# Altium footprint library SYNCBOX_V3I1.PcbLib: 251 footprints (part 12 of 16)
Each footprint in its own frame and in the unit in brackets; x right, y up, seen from the top. Pads: shape width x height; smd on the part's side, far side on the other; paste and mask are expansions set on the pad; w line width, h text height; cw(c..) or ccw(c..) is an arc to the next point about the centre after c.
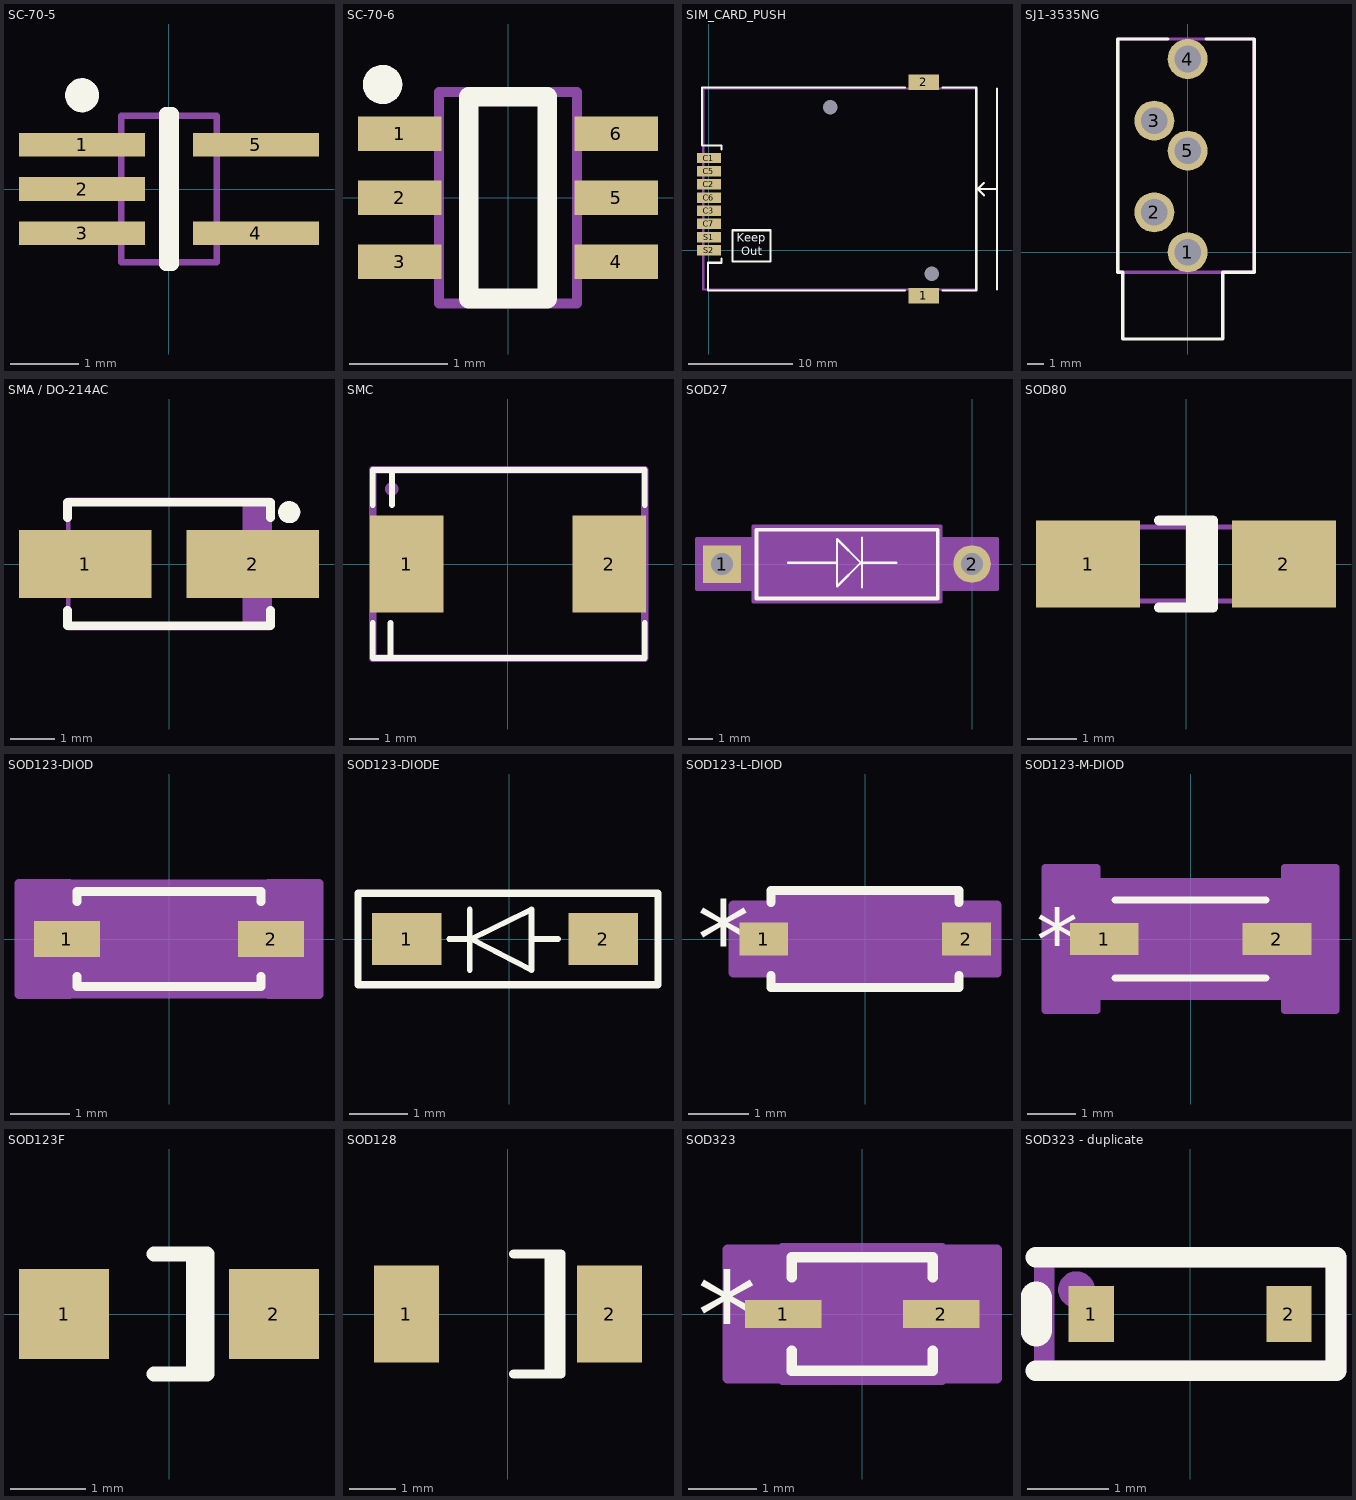
[diagram p11: the footprints below, top view; thin cyan lines are the x and y axes]

## SC-70-5 [mm] "SOT23, 5-Leads, Body 2.2x2.4mm (max), Pitch 0.65mm, IPC Medium Density"
height 1.1
pads (5):
  rect 1.85x0.35 smd: 1(-1.275,0.65) 2(-1.275,0) 3(-1.275,-0.65) 4(1.275,-0.65) 5(1.275,0.65)
Top Overlay:
  circle w0.25: c-1.275,1.375 r0.125
  lines w0.2: -0.05,-1.1 0.05,-1.1 0.05,1.1 -0.05,1.1 -0.05,-1.1
Mechanical 13:
  lines w0.1: -0.7,-1.075 -0.7,1.075 0.7,1.075 0.7,-1.075 -0.7,-1.075
3D body: height 1.1, standoff 0, extent -0.7,-1.075 0.7,1.075

## SC-70-6 [mm]
height 1.1
pads (6):
  rect 0.85x0.35 smd: 1(-1.1,0.65) 2(-1.1,0) 3(-1.1,-0.65) 4(1.1,-0.65) 5(1.1,0) 6(1.1,0.65)
Top Overlay:
  circle w0.2: c-1.275,1.15 r0.1
  lines w0.2: -0.4,-1.025 0.4,-1.025 0.4,1.025 -0.4,1.025 -0.4,-1.025
Mechanical 13:
  lines w0.1: -0.7,-1.075 -0.7,1.075 0.7,1.075 0.7,-1.075 -0.7,-1.075
3D body: height 1.1, standoff 0, extent -0.7,-1.075 0.7,1.075

## SIM_CARD_PUSH [mm]
pads (12):
  rect 2.95x1.5 smd: 1(20.7,-4.37) 2(20.7,16.18)
  rrect70% 0x0 hole 1.4: 3(21.47,-2.26) 4(11.67,13.79)
  rect 2.3x1 smd mask+0.051: C1(0,8.89) C2(0,6.35) C3(0,3.81) C5(0,7.62) C6(0,5.08) C7(0,2.54) S1(0,1.27) S2(0,0)
Top Overlay:
  lines w0.2: 1.19,9.71 1.19,10.1 -0.65,10.1 -0.65,15.68 18.9,15.68 ; 1.2,-0.8 1.2,-1.2 -0.1,-1.2 -0.1,-3.87 18.9,-3.87 ; 22.5,-3.87 25.75,-3.87 25.75,15.68 22.5,15.68 ; 26.5,5.3 25.9,5.9 ; 26.5,6.5 25.9,5.9 ; 27.75,-3.77 27.75,15.58 ; 27.75,5.9 25.9,5.9 ; 2.25,-1.07 2.25,1.93 5.95,1.93 5.95,-1.07 2.25,-1.07
  text "Out" at 3.1,-0.5 h0.8
  text "Keep" at 2.7,0.8 h0.8
Mechanical 16:
  lines w0.2: -0.55,-3.77 -0.55,15.58 25.75,15.58 25.75,-3.77 -0.55,-3.77
Mechanical 29:
  text ".Designator" at 14.5,6 h1.52
3D body "475531001.stp": height 1.8, standoff -0.7, extent -0.55,-4.6 25.95,16.35

## SJ1-3535NG [mm]
pads (5):
  round 2.4 hole 1.6: 1(0,0) 2(-2,2.4) 3(-2,7.9) 4(0,11.6) 5(0,6.1)
Top Overlay:
  lines w0.2: -1.2,12.8 -4.2,12.8 -4.2,-1.2 -3.9,-1.2 -3.9,-5.2 2.1,-5.2 2.1,-1.2 4,-1.2 4,12.8 1.1,12.8
Top Solder:
  region: -1.65,8.65 0.65,6.35 -0.35,5.35 -2.65,7.65
Mechanical 1:
  lines w0.2: -4.2,12.8 -4.2,12.8
Mechanical 16:
  lines w0.2: -4.2,-1.2 -4.2,12.8 4,12.8 4,-1.2 -4.2,-1.2
Mechanical 29:
  text ".Designator" at -2,5.5 h1.2
3D body "SJ1-3535NG-PI.step": height 12.3, standoff -3.3, extent -4.2,-5.25 4,12.8

## SMA / DO-214AC [mm]
height 2.62
pads (2):
  rect 3x1.55 smd: 1(-1.9,0) 2(1.9,0)
Top Overlay:
  circle w0.25: c2.725,1.175 r0.125
  lines w0.2: -2.3,-1.05 -2.3,-1.4 2.3,-1.4 2.3,-1.05 ; -2.3,1.05 -2.3,1.4 2.3,1.4 2.3,1.05
Mechanical 13:
  rectangle: 1.67,-1.46 2.285,1.46
  lines w0.1: -2.285,-1.46 -2.285,1.46 2.285,1.46 2.285,-1.46 -2.285,-1.46
3D body: height 2.62, standoff 0, extent -2.285,-1.46 2.285,1.46

## SMC [mm]
pads (2):
  rect 2.5x3.3 smd: 1(-3.45,0) 2(3.45,0)
Top Overlay:
  lines w0.2: -4.6,-2 -4.6,-3.2 4.65,-3.2 4.65,-2 ; -4.6,2 -4.6,3.2 4.65,3.2 4.65,2 ; -4,-3.2 -4,-2 ; -3.95,2 -3.95,3.2
Mechanical 16:
  circle w0.254: c-3.95,2.55 r0.1
  lines w0.254: -4.6,-3.2 4.65,-3.2 4.65,3.2 -4.6,3.2 -4.6,-3.2
Mechanical 29:
  text ".Designator" at 2.1,0.8 h1.52
3D body "DO-214AB SMC.step": height 2.3, standoff 0, extent -3.975,-2.95 3.975,2.95

## SOD27 [mil]
pads (2):
  rect 60x60 / inner round 60 / far side rect 60x60 hole 35 paste+0 mask+0: 1(-400,0)
  round 60 hole 35 paste+0 mask+0: 2(0,0)
Top Overlay:
  lines w3.94: -294,2 -216,2 ; -176,-37 -176,42 ; -121,2 -178,2 ; -178,2 -216,40 -216,-36 -178,2
  lines w6: -345,-55 -55,-55 -55,55 -345,55 -345,-55
Mechanical 13:
  lines w1: -400,0 -340,0 ; -60,0 0,0 ; -340,-50 -60,-50 -60,50 -340,50 -340,-50
Mechanical 15:
  region: -350,-40 -440,-40 -440,40 -350,40 -350,60 -50,60 -50,40 40,40 40,-40 -50,-40 -50,-60 -350,-60
  lines w6: -440,-40 -440,40 -350,40 -350,60 -50,60 -50,40 40,40 40,-40 -50,-40 -50,-60 -350,-60 -350,-40 -440,-40
3D body: height 10, standoff 0, extent 0,0 10,10
3D body "SOD27.stp": height 100, standoff -110, extent -415,-50 15,50

## SOD80 [mm] "MELF Diode, 2-Leads, Body 3,4x1,4mm, IPC Low Density"
height 1.5
pads (2):
  rect 2.1x1.75 smd: 1(-1.975,0) 2(1.975,0)
Top Overlay:
  rectangle: 0,-0.875 0.55,0.875
  lines w0.2: -0.55,-0.875 0.55,-0.875 0.55,0.875 -0.55,0.875
Mechanical 13:
  rectangle: 1.316,-0.75 1.8,0.75
  lines w0.1: -1.8,-0.75 1.8,-0.75 1.8,0.75 -1.8,0.75 -1.8,-0.75
3D body: height 1.5, standoff 0, extent -1.8,-0.75 1.8,0.75

## SOD123-DIOD [mm]
pads (2):
  rect 1.111x0.601 smd paste+0 mask+0: 1(-1.725,0) 2(1.725,0)
Top Overlay:
  lines w0.152: -1.552,-0.633 -1.552,-0.802 1.552,-0.802 1.552,-0.633 ; -1.552,0.633 -1.552,0.802 1.552,0.802 1.552,0.633
Mechanical 13:
  lines w0.025: -1.425,-0.337 -1.087,-0.675 ; -1.425,0.337 -1.087,0.675 ; -1.925,-0.275 -1.425,-0.275 -1.425,0.275 -1.925,0.275 -1.925,-0.275 ; -1.425,-0.675 -1.425,0.675 1.425,0.675 1.425,-0.675 -1.425,-0.675 ; 1.425,-0.275 1.925,-0.275 1.925,0.275 1.425,0.275 1.425,-0.275
  text "*" at -1.488,-0.635 h1.27
Mechanical 15:
  region: -1.679,-0.937 -2.535,-0.937 -2.535,0.937 -1.679,0.937 -1.679,0.929 1.679,0.929 1.679,0.937 2.535,0.937 2.535,-0.937 1.679,-0.937 1.679,-0.929 -1.679,-0.929
  lines w0.152: -2.535,-0.937 -1.679,-0.937 -1.679,-0.929 1.679,-0.929 1.679,-0.937 2.535,-0.937 2.535,0.937 1.679,0.937 1.679,0.929 -1.679,0.929 -1.679,0.937 -2.535,0.937 -2.535,-0.937
3D body "SOD123.stp": height 0.81, standoff 0, extent -1.925,-0.675 1.925,0.675
3D body: height 0.25, standoff 0, extent 0,0 0.254,0.254

## SOD123-DIODE [mm]
pads (2):
  rect 1.2x0.9 smd: 1(-1.778,0) 2(1.622,0)
Top Overlay:
  lines w0.1: -1.041,0 -0.66,0 ; -0.686,-0.533 -0.686,0.508 ; 0.432,0 0.838,0 ; -0.66,0 0.381,0.508 0.381,-0.533 -0.66,0
  lines w0.127: -2.616,-0.787 2.565,-0.787 2.565,0.787 -2.616,0.787 -2.616,-0.787
3D body "SOD123.stp": height 0.81, standoff 0, extent -1.925,-0.675 1.925,0.675

## SOD123-L-DIOD [mm]
pads (2):
  rect 0.806x0.55 smd paste+0 mask+0: 1(-1.674,0) 2(1.674,0)
Top Overlay:
  lines w0.152: -1.552,-0.608 -1.552,-0.802 1.552,-0.802 1.552,-0.608 ; -1.552,0.608 -1.552,0.802 1.552,0.802 1.552,0.608
  text "*" at -2.776,-0.635 h1.27
Mechanical 13:
  lines w0.025: -1.425,-0.337 -1.087,-0.675 ; -1.425,0.337 -1.087,0.675 ; -1.925,-0.275 -1.425,-0.275 -1.425,0.275 -1.925,0.275 -1.925,-0.275 ; -1.425,-0.675 -1.425,0.675 1.425,0.675 1.425,-0.675 -1.425,-0.675 ; 1.425,-0.275 1.925,-0.275 1.925,0.275 1.425,0.275 1.425,-0.275
  text "*" at -1.488,-0.635 h1.27
Mechanical 15:
  region: -1.527,-0.556 -2.179,-0.556 -2.179,0.556 -1.527,0.556 -1.527,0.777 1.527,0.777 1.527,0.556 2.179,0.556 2.179,-0.556 1.527,-0.556 1.527,-0.777 -1.527,-0.777
  lines w0.152: -2.179,-0.556 -1.527,-0.556 -1.527,-0.777 1.527,-0.777 1.527,-0.556 2.179,-0.556 2.179,0.556 1.527,0.556 1.527,0.777 -1.527,0.777 -1.527,0.556 -2.179,0.556 -2.179,-0.556
3D body "SOD123-L.stp": height 0.81, standoff 0, extent -1.925,-0.675 1.925,0.675
3D body: height 0.25, standoff 0, extent 0,0 0.254,0.254

## SOD123-M-DIOD [mm]
pads (2):
  rect 1.416x0.652 smd paste+0 mask+0: 1(-1.776,0) 2(1.776,0)
Top Overlay:
  lines w0.152: -1.552,-0.802 1.552,-0.802 ; -1.552,0.802 1.552,0.802
  text "*" at -3.182,-0.635 h1.27
Mechanical 13:
  lines w0.025: -1.425,-0.337 -1.087,-0.675 ; -1.425,0.337 -1.087,0.675 ; -1.925,-0.275 -1.925,0.275 -1.425,0.275 -1.425,-0.275 -1.925,-0.275 ; -1.425,-0.675 1.425,-0.675 1.425,0.675 -1.425,0.675 -1.425,-0.675 ; 1.425,-0.275 1.425,0.275 1.925,0.275 1.925,-0.275 1.425,-0.275
  text "*" at -1.488,-0.635 h1.27
Mechanical 15:
  region: -1.933,-1.47 -2.992,-1.47 -2.992,1.47 -1.933,1.47 -1.933,1.183 1.933,1.183 1.933,1.47 2.992,1.47 2.992,-1.47 1.933,-1.47 1.933,-1.183 -1.933,-1.183
  lines w0.152: -2.992,-1.47 -2.992,1.47 -1.933,1.47 -1.933,1.183 1.933,1.183 1.933,1.47 2.992,1.47 2.992,-1.47 1.933,-1.47 1.933,-1.183 -1.933,-1.183 -1.933,-1.47 -2.992,-1.47
3D body: height 0.25, standoff 0, extent 0,0 0.254,0.254
3D body "SOD123-M.stp": height 0.81, standoff 0, extent -1.925,-0.675 1.925,0.675

## SOD123F [mm] "1.6 x 2.6 BODY"
height 1.2
pads (2):
  rect 1.2x1.2 smd: 1(-1.4,0) 2(1.4,0)
Top Overlay:
  lines w0.2: -0.2,-0.8 0.508,-0.8 0.508,0.8 -0.2,0.8 ; 0.325,-0.8 0.325,0.8
3D body "CGRKM.stp": height 1.7, standoff 0, extent -1.854,-0.902 1.854,0.902

## SOD128 [mm] "2.5 x 3.8MM BODY"
height 1.1
pads (2):
  rect 1.4x2.1 smd: 1(-2.2,0) 2(2.2,0)
Top Overlay:
  lines w0.2: 0.127,-1.3 1.143,-1.3 ; 0.127,1.3 1.143,1.3 1.143,-1.3 ; 0.889,-1.3 0.889,1.3 1.016,1.173 1.016,-1.173 1.143,-1.3
3D body: height 1.1, standoff 0, extent -2.159,-1.397 2.159,1.397

## SOD323 [mm]
pads (2):
  rect 1.111x0.401 smd paste+0 mask+0: 1(-1.15,0) 2(1.15,0)
Top Overlay:
  lines w0.152: -1.027,-0.533 -1.027,-0.827 1.027,-0.827 1.027,-0.533 ; -1.027,0.533 -1.027,0.827 1.027,0.827 1.027,0.533
  text "*" at -2.404,-0.635 h1.27
Mechanical 13:
  lines w0.025: -0.9,-0.35 -0.55,-0.7 ; -0.9,0.35 -0.55,0.7 ; -1.35,-0.175 -1.35,0.175 -0.9,0.175 -0.9,-0.175 -1.35,-0.175 ; -0.9,-0.7 0.9,-0.7 0.9,0.7 -0.9,0.7 -0.9,-0.7 ; 0.9,-0.175 0.9,0.175 1.35,0.175 1.35,-0.175 0.9,-0.175
  text "*" at -0.964,-0.635 h1.27
Mechanical 15:
  region: -1.154,-0.937 -1.96,-0.937 -1.96,0.937 -1.154,0.937 -1.154,0.954 1.154,0.954 1.154,0.937 1.96,0.937 1.96,-0.937 1.154,-0.937 1.154,-0.954 -1.154,-0.954
  lines w0.152: -1.96,-0.937 -1.96,0.937 -1.154,0.937 -1.154,0.954 1.154,0.954 1.154,0.937 1.96,0.937 1.96,-0.937 1.154,-0.937 1.154,-0.954 -1.154,-0.954 -1.154,-0.937 -1.96,-0.937
3D body: height 0.25, standoff 0, extent 0,0 0.254,0.254
3D body "SOD323.stp": height 0.81, standoff 0, extent -1.35,-0.7 1.35,0.7

## SOD323 - duplicate [mil]
pads (2):
  rect 22x27 smd mask+3: 1(-48,0) 2(48,0)
Top Overlay:
  lines w10: -74.8,-27.56 70.87,-27.56 70.87,27.56 -74.8,27.56
  lines w15.75: -74.8,-7.87 -74.8,7.87
Mechanical 16:
  circle w10: c-55.12,11.81 r3.94
  lines w10: -70.87,-27.56 70.87,-27.56 70.87,27.56 -70.87,27.56 -70.87,-27.56
Mechanical 29:
  text ".Designator" at -7.87,-7.87 h15.75
3D body "SOD323.step": height 38.78, standoff -0.2, extent -49.21,-24.6 49.21,24.61